# Altium footprint library Inductor.PcbLib: 58 footprints (part 4 of 4)
Each footprint in its own frame and in the unit in brackets; x right, y up, seen from the top. Pads: shape width x height; smd on the part's side, far side on the other; paste and mask are expansions set on the pad; w line width, h text height; cw(c..) or ccw(c..) is an arc to the next point about the centre after c.
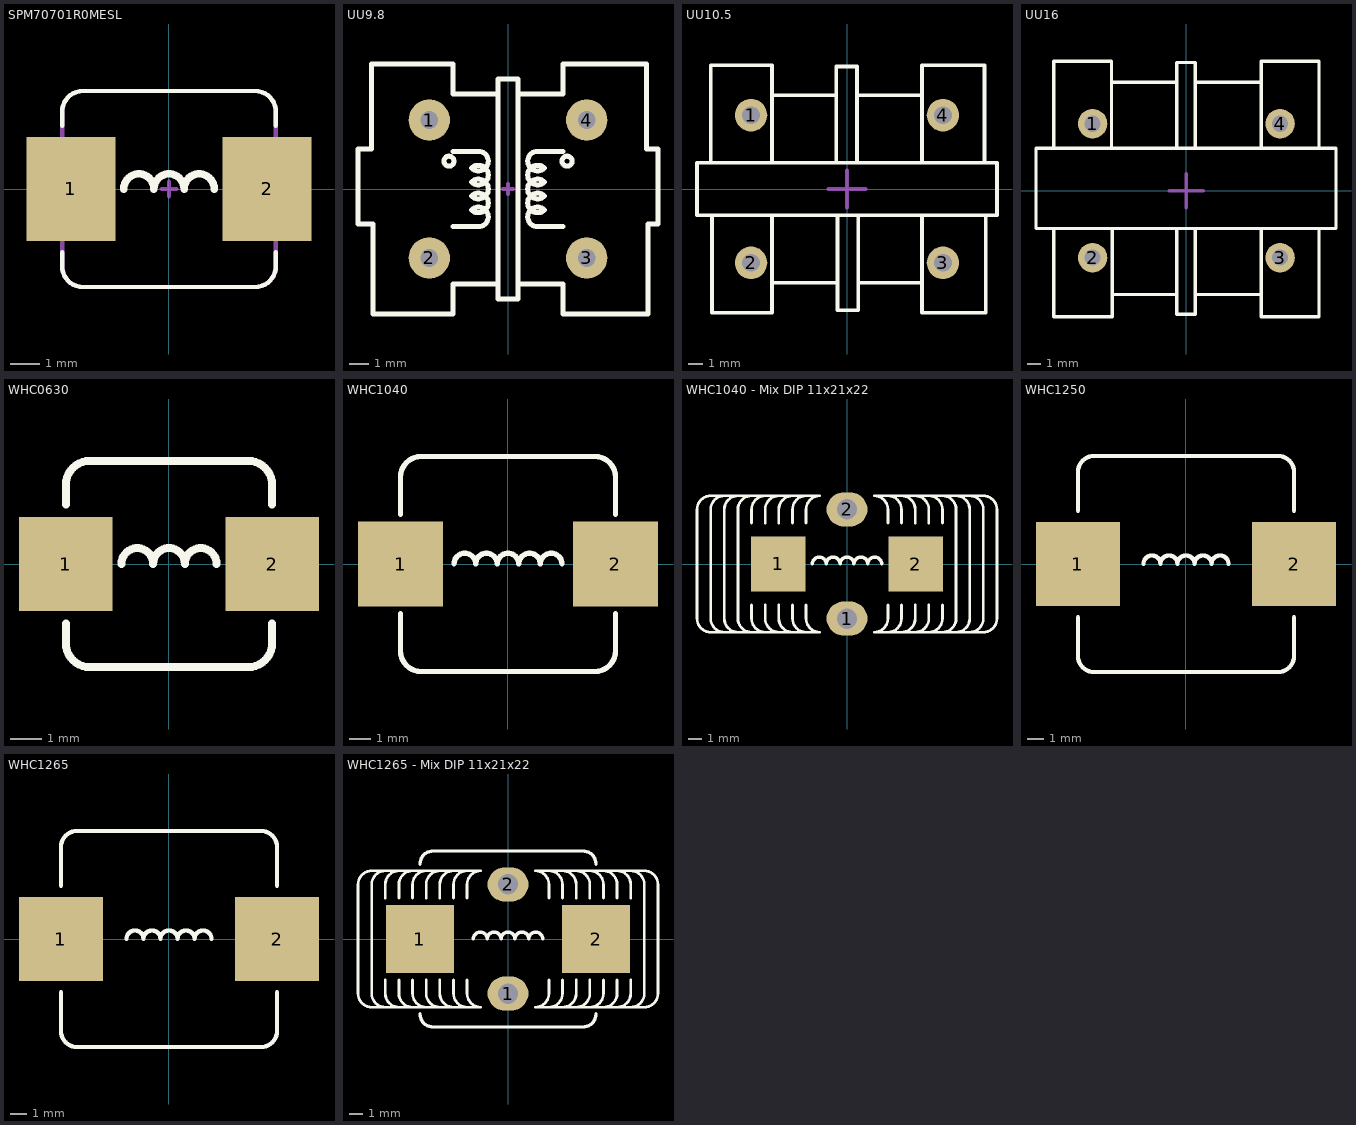
[diagram p3: the footprints below, top view; thin cyan lines are the x and y axes]

## SPM70701R0MESL [mm] "7.2*6.6*3 mm"
pads (2):
  rect 3x3.5 smd: 1(-3.302,0) 2(3.302,0)
Top Overlay:
  lines w0.15: -3.6,-2.125 -3.6,-2.6 ccw(c-2.9,-2.6) -2.9,-3.3 2.9,-3.3 ccw(c2.9,-2.6) 3.6,-2.6 3.6,-2.125 ; -3.6,2.125 -3.6,2.6 cw(c-2.9,2.6) -2.9,3.3 2.9,3.3 cw(c2.9,2.6) 3.6,2.6 3.6,2.125
  lines w0.254: -1.524,0 cw(c-1.016,0) -0.508,0 cw(c0,0) 0.508,0 cw(c1.016,0) 1.524,0
Top Designator:
  text ".Designator" at -3.71,-0.344 h1.52
Top Component Outline:
  lines w0.15: -3.6,-2.6 ccw(c-2.9,-2.6) -2.9,-3.3 2.9,-3.3 ccw(c2.9,-2.6) 3.6,-2.6 3.6,2.6 ccw(c2.9,2.6) 2.9,3.3 -2.9,3.3 ccw(c-2.9,2.6) -3.6,2.6 -3.6,-2.6
Top Component Center (Mech8):
  lines w0.15: -0.25,0 0.25,0 ; 0,-0.25 0,0.25
3D body: height 3, standoff 0, extent -3.6,-3.3 3.6,3.3

## UU9.8 [mm]
pads (4):
  round 2.1 hole 0.9: 1(-4,3.5) 2(-4,-3.5) 3(4,-3.5) 4(4,3.5)
Top Overlay:
  circle w0.254: c3,1.414 r0.254
  circle w0.254: c-3,1.414 r0.254
  lines w0.254: -2.794,-1.914 -1.5,-1.914 ccw(c-1.5,-1.414) -1.854,-1.061 ccw(c-1.5,-0.707) -1.854,-0.354 ccw(c-1.5,0) -1.854,0.354 ccw(c-1.5,0.707) -1.854,1.061 ccw(c-1.5,1.414) -1.5,1.914 -2.794,1.914 ; -0.638,-4.826 -2.794,-4.826 -2.794,-6.35 -6.858,-6.35 -6.858,-1.778 -7.62,-1.778 -7.62,2.032 -6.943,2.032 -6.943,6.35 -2.794,6.35 -2.794,4.826 -0.508,4.826 ; 0.508,-4.826 2.794,-4.826 2.794,-6.35 7.112,-6.35 7.112,-1.778 7.62,-1.778 7.62,2.032 7.027,2.032 7.027,6.35 2.794,6.35 2.794,4.826 0.508,4.826 ; 2.794,-1.914 1.5,-1.914 cw(c1.5,-1.414) 1.854,-1.061 cw(c1.5,-0.707) 1.854,-0.354 cw(c1.5,0) 1.854,0.354 cw(c1.5,0.707) 1.854,1.061 cw(c1.5,1.414) 1.5,1.914 2.794,1.914 ; -0.508,-5.588 -0.508,-1.778 -0.508,2.032 -0.508,5.588 0.508,5.588 0.508,2.032 0.508,-1.778 0.508,-5.588 -0.508,-5.588
Top Designator:
  text ".Designator" at -3.71,-0.344 h1.52
Mechanical 15:
  lines w0.2: -0.254,0 0.254,0 ; 0,-0.254 0,0.254
3D body "UU9.8.STEP": height 17.05, standoff -3.45, extent -8.5,-6 8.5,6

## UU10.5 [mm] "18*16*20mm"
pads (4):
  round 2.2 hole 1.2: 1(-6.5,5) 2(-6.5,-5) 3(6.5,-5) 4(6.5,5)
Top Overlay:
  lines w0.254: -9.229,1.904 -9.229,8.382 -5.08,8.382 -5.08,1.904 ; -9.144,-1.81 -9.144,-8.382 -5.08,-8.382 -5.08,-1.81 ; -5.08,-6.35 -0.638,-6.35 ; -5.08,6.35 -0.723,6.35 ; -0.723,1.904 -0.723,8.304 0.677,8.304 0.677,1.904 ; -0.638,-1.81 -0.638,-8.21 0.762,-8.21 0.762,-1.81 ; 0.677,6.35 5.08,6.35 ; 0.762,-6.35 5.08,-6.35 ; 5.08,-1.904 5.08,-8.382 9.398,-8.382 9.398,-1.904 ; 5.08,1.904 5.08,8.382 9.313,8.382 9.313,1.904 ; -10.16,-1.778 -10.16,1.778 10.16,1.778 10.16,-1.778 -10.16,-1.778
Top Designator:
  text ".Designator" at -3.71,-0.344 h1.52
Mechanical 15:
  lines w0.254: -1.27,0 1.27,0 ; 0,-1.27 0,1.27
3D body "UU10.5.STEP": height 21.05, standoff -3.45, extent -9.4,-8 9.4,8

## UU16 [mm] "22*17.5*23mm"
pads (4):
  round 2.2 hole 1.2: 1(-7,5) 2(-7,-5) 3(7,-5) 4(7,5)
Top Overlay:
  lines w0.254: -9.906,-2.826 -9.906,-9.398 -5.523,-9.398 -5.523,-2.826 ; -9.906,3.174 -9.906,9.652 -5.588,9.652 -5.588,3.174 ; -5.523,-7.749 -0.723,-7.749 ; -5.523,8.097 -0.723,8.097 ; -0.723,-2.826 -0.723,-9.226 0.677,-9.226 0.677,-2.826 ; -0.723,3.174 -0.723,9.574 0.677,9.574 0.677,3.174 ; 0.677,-7.749 5.477,-7.749 ; 0.677,8.097 5.477,8.097 ; 5.588,-2.92 5.588,-9.398 9.906,-9.398 9.906,-2.92 ; 5.588,3.174 5.588,9.652 9.906,9.652 9.906,3.174 ; -11.223,-2.826 -11.223,3.174 11.177,3.174 11.177,-2.826 -11.223,-2.826
Top Designator:
  text ".Designator" at -3.733,-0.217 h1.52
Mechanical 15:
  lines w0.254: -1.27,0 1.27,0 ; 0,-1.27 0,1.27
3D body "UU16.STEP": height 22.05, standoff -3.45, extent -11,-8.75 11,8.75

## WHC0630 [mm] "6.6*6.6*3.4mm"
pads (2):
  rect 3x3 smd: 1(-3.302,0) 2(3.302,0)
Top Overlay:
  lines w0.254: -3.302,-1.905 -3.302,-2.54 ccw(c-2.54,-2.54) -2.54,-3.302 2.54,-3.302 ccw(c2.54,-2.54) 3.302,-2.54 3.302,-1.905 ; -3.302,1.905 -3.302,2.54 cw(c-2.54,2.54) -2.54,3.302 2.54,3.302 cw(c2.54,2.54) 3.302,2.54 3.302,1.905 ; -1.524,0 cw(c-1.016,0) -0.508,0 cw(c0,0) 0.508,0 cw(c1.016,0) 1.524,0
Top Designator:
  text ".Designator" at -3.71,-0.344 h1.52
3D body "WHC0630.stp": height 3.2, standoff 0, extent -3.3,-3.3 3.3,3.3

## WHC1040 [mm] "10*10*4mm"
pads (2):
  rect 4x4 smd: 1(-5.057,0) 2(5.057,0)
Top Overlay:
  lines w0.254: -5.057,-2.332 -5.057,-4.087 ccw(c-4.087,-4.087) -4.087,-5.057 4.087,-5.057 ccw(c4.087,-4.087) 5.057,-4.087 5.057,-2.332 ; -5.057,2.332 -5.057,4.087 cw(c-4.087,4.087) -4.087,5.057 4.087,5.057 cw(c4.087,4.087) 5.057,4.087 5.057,2.332 ; -2.54,0 cw(c-2.032,0) -1.524,0 cw(c-1.016,0) -0.508,0 cw(c0,0) 0.508,0 cw(c1.016,0) 1.524,0 cw(c2.032,0) 2.54,0
Top Designator:
  text ".Designator" at -3.71,-0.344 h1.52
3D body "WHC1040.stp": height 4.2, standoff 0, extent -5,-5.057 5,4.943

## WHC1040 - Mix DIP 11x21x22 [mm] "10*10*4mm"
pads (4):
  rect 4x4 smd: 1(-5.057,0) 2(5.057,0)
  oval 3x2.5 hole 1.5: 1(0,-4) 2(0,4)
Top Overlay:
  lines w0.2: -9,-5 cw(c-9,-4) -10,-4 -10,4 cw(c-9,4) -9,5 ; -8,-5 cw(c-8,-4) -9,-4 -9,4 cw(c-8,4) -8,5 ; -7,-5 cw(c-7,-4) -8,-4 -8,4 cw(c-7,4) -7,5 ; -7,-3 -7,-4 ccw(c-6,-4) -6,-5 ; -7,3 -7,4 cw(c-6,4) -6,5 ; -6,-3 -6,-4 ccw(c-5,-4) -5,-5 ; -6,3 -6,4 cw(c-5,4) -5,5 ; -5,-3 -5,-4 ccw(c-4,-4) -4,-5 ; -5,3 -5,4 cw(c-4,4) -4,5 ; -4,-3 -4,-4 ccw(c-3,-4) -3,-5 ; -4,3 -4,4 cw(c-3,4) -3,5 ; -3,-3 -3,-4 ccw(c-2,-4) -2,-5 -10,-5 cw(c-10,-4) -11,-4 -11,4 cw(c-10,4) -10,5 -2,5 ccw(c-2,4) -3,4 -3,3 ; 3,-5 ccw(c3,-4) 4,-4 4,-3 ; 3,-3 3,-4 cw(c2,-4) 2,-5 10,-5 ccw(c10,-4) 11,-4 11,4 ccw(c10,4) 10,5 2,5 cw(c2,4) 3,4 3,3 ; 3,5 cw(c3,4) 4,4 4,3 ; 4,-5 ccw(c4,-4) 5,-4 5,-3 ; 4,5 cw(c4,4) 5,4 5,3 ; 5,-5 ccw(c5,-4) 6,-4 6,-3 ; 5,5 cw(c5,4) 6,4 6,3 ; 6,-5 ccw(c6,-4) 7,-4 7,-3 ; 6,5 cw(c6,4) 7,4 7,3 ; 7,-5 ccw(c7,-4) 8,-4 8,4 ccw(c7,4) 7,5 ; 8,-5 ccw(c8,-4) 9,-4 9,4 ccw(c8,4) 8,5 ; 9,-5 ccw(c9,-4) 10,-4 10,4 ccw(c9,4) 9,5
  lines w0.254: -2.54,0 cw(c-2.032,0) -1.524,0 cw(c-1.016,0) -0.508,0 cw(c0,0) 0.508,0 cw(c1.016,0) 1.524,0 cw(c2.032,0) 2.54,0
Top Designator:
  text ".Designator" at -3.71,-0.344 h1.52
3D body "WHC1040.stp": height 4.2, standoff 0, extent -5,-5.057 5,4.943

## WHC1250 [mm] "12.8*12.8*5mm"
pads (2):
  rect 5x5 smd: 1(-6.454,0) 2(6.454,0)
Top Overlay:
  lines w0.254: -6.454,-3.175 -6.454,-5.484 ccw(c-5.484,-5.484) -5.484,-6.454 5.484,-6.454 ccw(c5.484,-5.484) 6.454,-5.484 6.454,-3.175 ; -6.454,3.175 -6.454,5.484 cw(c-5.484,5.484) -5.484,6.454 5.484,6.454 cw(c5.484,5.484) 6.454,5.484 6.454,3.175 ; -2.54,0 cw(c-2.032,0) -1.524,0 cw(c-1.016,0) -0.508,0 cw(c0,0) 0.508,0 cw(c1.016,0) 1.524,0 cw(c2.032,0) 2.54,0
Top Designator:
  text ".Designator" at -3.71,-0.344 h1.52
3D body "WHC1235.stp": height 6.7, standoff 0, extent -6.5,-6.454 6.5,6.546

## WHC1265 [mm] "WHC1265(12*6.5)"
pads (2):
  rect 5x5 smd: 1(-6.454,0) 2(6.454,0)
Top Overlay:
  lines w0.254: -6.454,-3.175 -6.454,-5.484 ccw(c-5.484,-5.484) -5.484,-6.454 5.484,-6.454 ccw(c5.484,-5.484) 6.454,-5.484 6.454,-3.175 ; -6.454,3.175 -6.454,5.484 cw(c-5.484,5.484) -5.484,6.454 5.484,6.454 cw(c5.484,5.484) 6.454,5.484 6.454,3.175 ; -2.54,0 cw(c-2.032,0) -1.524,0 cw(c-1.016,0) -0.508,0 cw(c0,0) 0.508,0 cw(c1.016,0) 1.524,0 cw(c2.032,0) 2.54,0
Top Designator:
  text ".Designator" at -3.71,-0.344 h1.52
3D body "CIP1265.step": height 6.7, standoff 0, extent -6.55,-6.4 6.55,6.4

## WHC1265 - Mix DIP 11x21x22 [mm] "WHC1265(12*6.5)"
pads (4):
  rect 5x5 smd: 1(-6.454,0) 2(6.454,0)
  oval 3x2.5 hole 1.5: 1(0,-4) 2(0,4)
Top Overlay:
  lines w0.2: -9,-5 cw(c-9,-4) -10,-4 -10,4 cw(c-9,4) -9,5 ; -9,-3 -9,-4 ccw(c-8,-4) -8,-5 ; -9,3 -9,4 cw(c-8,4) -8,5 ; -8,-3 -8,-4 ccw(c-7,-4) -7,-5 ; -8,3 -8,4 cw(c-7,4) -7,5 ; -7,-3 -7,-4 ccw(c-6,-4) -6,-5 ; -7,3 -7,4 cw(c-6,4) -6,5 ; -6,-3 -6,-4 ccw(c-5,-4) -5,-5 ; -6,3 -6,4 cw(c-5,4) -5,5 ; -5,-3 -5,-4 ccw(c-4,-4) -4,-5 ; -5,3 -5,4 cw(c-4,4) -4,5 ; -4,-3 -4,-4 ccw(c-3,-4) -3,-5 ; -4,3 -4,4 cw(c-3,4) -3,5 ; -3,-3 -3,-4 ccw(c-2,-4) -2,-5 -10,-5 cw(c-10,-4) -11,-4 -11,4 cw(c-10,4) -10,5 -2,5 ccw(c-2,4) -3,4 -3,3 ; 3,-5 ccw(c3,-4) 4,-4 4,-3 ; 3,-3 3,-4 cw(c2,-4) 2,-5 10,-5 ccw(c10,-4) 11,-4 11,4 ccw(c10,4) 10,5 2,5 cw(c2,4) 3,4 3,3 ; 3,5 cw(c3,4) 4,4 4,3 ; 4,-5 ccw(c4,-4) 5,-4 5,-3 ; 4,5 cw(c4,4) 5,4 5,3 ; 5,-5 ccw(c5,-4) 6,-4 6,-3 ; 5,5 cw(c5,4) 6,4 6,3 ; 6,-5 ccw(c6,-4) 7,-4 7,-3 ; 6,5 cw(c6,4) 7,4 7,3 ; 7,-5 ccw(c7,-4) 8,-4 8,-3 ; 7,5 cw(c7,4) 8,4 8,3 ; 8,-5 ccw(c8,-4) 9,-4 9,-3 ; 8,5 cw(c8,4) 9,4 9,3 ; 9,-5 ccw(c9,-4) 10,-4 10,4 ccw(c9,4) 9,5
  lines w0.254: -6.454,-5.484 ccw(c-5.484,-5.484) -5.484,-6.454 5.484,-6.454 ccw(c5.484,-5.484) 6.454,-5.484 ; -6.454,5.484 cw(c-5.484,5.484) -5.484,6.454 5.484,6.454 cw(c5.484,5.484) 6.454,5.484 ; -2.54,0 cw(c-2.032,0) -1.524,0 cw(c-1.016,0) -0.508,0 cw(c0,0) 0.508,0 cw(c1.016,0) 1.524,0 cw(c2.032,0) 2.54,0
Top Designator:
  text ".Designator" at -3.71,-0.344 h1.52
3D body "CIP1265.step": height 6.7, standoff 0, extent -6.55,-6.4 6.55,6.4